# Altium footprint library PCB1.PcbLib: 14 footprints
Each footprint in its own frame and in the unit in brackets; x right, y up, seen from the top. Pads: shape width x height; smd on the part's side, far side on the other; paste and mask are expansions set on the pad; w line width, h text height; cw(c..) or ccw(c..) is an arc to the next point about the centre after c.
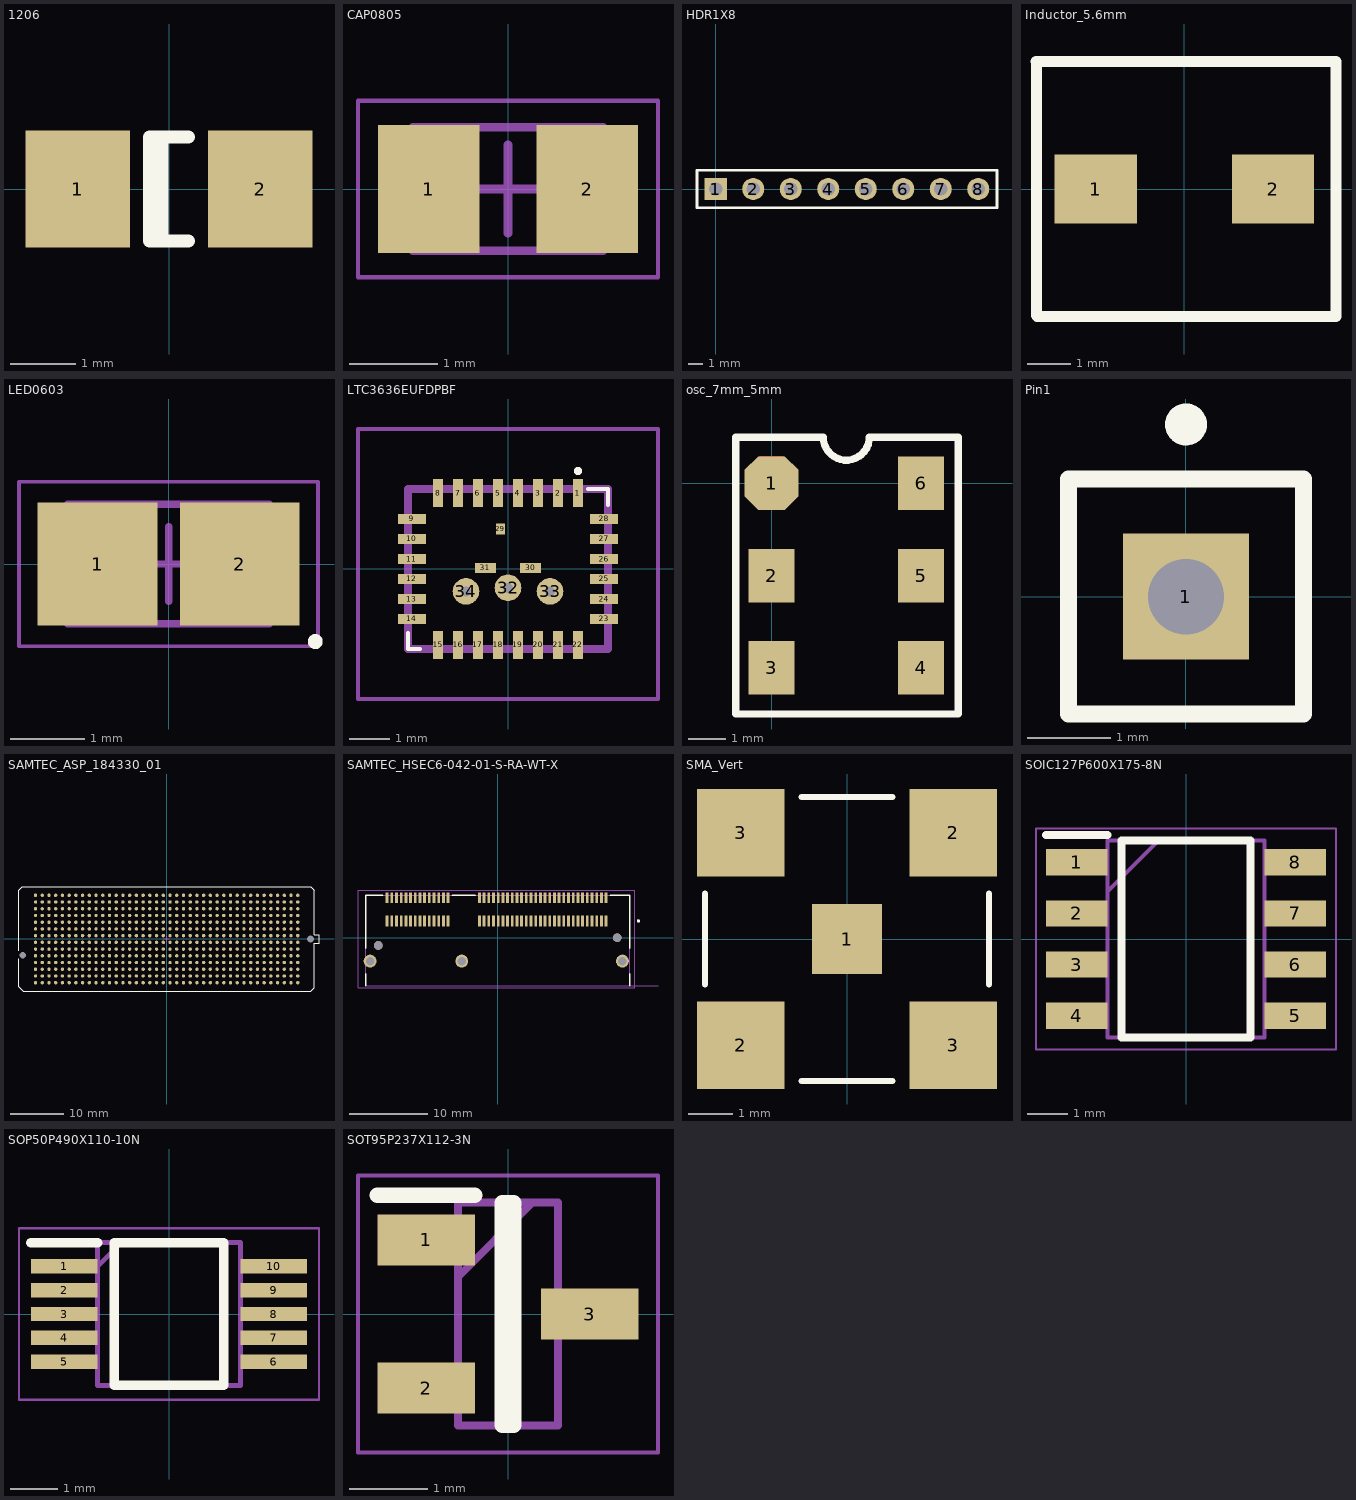
[diagram p0: the footprints below, top view; thin cyan lines are the x and y axes]

## 1206 [mm] "Chip Capacitor; Body 3.2 x 1.6 mm (LxW typ)"
height 1.5
pads (2):
  rect 1.6x1.8 smd: 1(-1.4,0) 2(1.4,0)
Top Overlay:
  lines w0.2: -0.11,-0.8 -0.11,0.8 ; 0.3,-0.8 -0.3,-0.8 -0.3,0.8 0.3,0.8

## CAP0805 [mm]
height 1
pads (2):
  rect 1.15x1.45 smd: 1(-0.9,0) 2(0.9,0)
Mechanical 13:
  lines w0.1: -1.075,-0.7 1.075,-0.7 1.075,0.7 -1.075,0.7 -1.075,-0.7
Mechanical 15:
  lines w0.05: -1.7,-1 1.7,-1 1.7,1 -1.7,1 -1.7,-1
  lines w0.1: -0.5,0 0.5,0 ; 0,-0.5 0,0.5
3D body: height 1, standoff 0, extent 0.675,-0.7 1.075,0.7
3D body: height 1, standoff 0, extent -1.075,-0.7 -0.675,0.7
3D body: height 1, standoff 0, extent -0.675,-0.7 0.675,0.7

## HDR1X8 [mm]
pads (8):
  rect 1.5x1.5 hole 0.9: 1(0,0)
  round 1.5 hole 0.9: 2(2.54,0) 3(5.08,0) 4(7.62,0) 5(10.16,0) 6(12.7,0) 7(15.24,0) 8(17.78,0)
Top Overlay:
  lines w0.2: -1.27,-1.27 -1.27,1.27 19.05,1.27 19.05,-1.27 -1.27,-1.27

## Inductor_5.6mm [mm]
pads (2):
  rect 1.9x1.6 smd: 1(-2.05,0) 2(2.05,0)
Top Overlay:
  lines w0.254: -3.429,2.95 3.505,2.95 3.505,-2.95 -3.4,-2.95 -3.423,-2.927 -3.423,-0.051 -3.423,2.899

## LED0603 [mm]
height 1
pads (2):
  rect 1.6x1.65 smd: 1(-0.95,0) 2(0.95,0)
Top Overlay:
  circle w0.1: c1.962,-1.037 r0.05
Mechanical 13:
  lines w0.1: -1.35,-0.8 1.35,-0.8 1.35,0.8 -1.35,0.8 -1.35,-0.8
Mechanical 15:
  lines w0.05: -2,-1.1 2,-1.1 2,1.1 -2,1.1 -2,-1.1
  lines w0.1: -0.5,0 0.5,0 ; 0,-0.5 0,0.5
3D body: height 1, standoff 0, extent 0.35,-0.8 1.35,0.8
3D body: height 1, standoff 0, extent -1.35,-0.8 -0.35,0.8
3D body: height 1, standoff 0, extent -0.35,-0.8 0.35,0.8

## LTC3636EUFDPBF [mm]
pads (34):
  rect 0.25x0.7 smd: 1(1.75,1.9) 2(1.25,1.9) 3(0.75,1.9) 4(0.25,1.9) 5(-0.25,1.9) 6(-0.75,1.9) 7(-1.25,1.9) 8(-1.75,1.9) 15(-1.75,-1.9) 16(-1.25,-1.9) 17(-0.75,-1.9) 18(-0.25,-1.9) 19(0.25,-1.9) 20(0.75,-1.9) 21(1.25,-1.9) 22(1.75,-1.9)
  rect 0.7x0.25 smd: 9(-2.4,1.25) 10(-2.4,0.75) 11(-2.4,0.25) 12(-2.4,-0.25) 13(-2.4,-0.75) 14(-2.4,-1.25) 23(2.4,-1.25) 24(2.4,-0.75) 25(2.4,-0.25) 26(2.4,0.25) 27(2.4,0.75) 28(2.4,1.25)
  rect 0.23x0.28 smd: 29(-0.19,1)
  rect 0.53x0.25 smd: 30(0.565,0.03) 31(-0.565,0.03)
  round 0.667 hole 0.25: 32(0,-0.47) 33(1.05,-0.56) 34(-1.05,-0.56)
Top Overlay:
  lines w0.1: -2.5,-1.6 -2.5,-2 -2.2,-2 ; 2,2 2.5,2 2.5,1.6 ; 1.75,2.4 ccw(c1.75,2.45) 1.75,2.5 ccw(c1.75,2.45) 1.75,2.4
Mechanical 13:
  lines w0.2: -2.5,-2 2.5,-2 2.5,2 -2.5,2 -2.5,-2
Mechanical 15:
  lines w0.1: -3.75,-3.25 3.75,-3.25 3.75,3.5 -3.75,3.5 -3.75,-3.25
3D body "LTC3636EUFD#PBF.stp": height 0.9, standoff -5, extent -2.5,-2 2.5,2

## osc_7mm_5mm [mm]
pads (6):
  oct 1.45x1.45 smd: 1(0,0)
  rect 1.25x1.45 smd: 2(0,-2.5) 3(0,-5) 4(4.05,-5) 5(4.05,-2.5) 6(4.05,0)
Top Layer:
  region: -0.625,-0.412 -0.312,-0.725 0.312,-0.725 0.625,-0.412 0.625,0.412 0.312,0.725 -0.312,0.725 -0.625,0.412
Top Overlay:
  lines w0.2: -0.965,-6.25 -0.965,1.25 1.4,1.25 ccw(c2.025,1.25) 2.65,1.25 5.055,1.25 5.055,-6.25 -0.965,-6.25

## Pin1 [mm]
pads (1):
  rect 1.5x1.5 hole 0.9: 1(0,0)
Top Overlay:
  circle w0.25: c0,2.05 r0.125
  lines w0.2: -1.4,-1.4 -1.4,1.4 1.4,1.4 1.4,-1.4 -1.4,-1.4

## SAMTEC_ASP_184330_01 [mm]
pads (562):
  round 0.64 smd: A1(24.765,5.715) A2(23.495,5.715) A3(22.225,5.715) A4(20.955,5.715) A5(19.685,5.715) A6(18.415,5.715) A7(17.145,5.715) A8(15.875,5.715) A9(14.605,5.715) A10(13.335,5.715) A11(12.065,5.715) A12(10.795,5.715) A13(9.525,5.715) A14(8.255,5.715) A15(6.985,5.715) A16(5.715,5.715) A17(4.445,5.715) A18(3.175,5.715) A19(1.905,5.715) A20(0.635,5.715) A21(-0.635,5.715) A22(-1.905,5.715) A23(-3.175,5.715) A24(-4.445,5.715) A25(-5.715,5.715) A26(-6.985,5.715) A27(-8.255,5.715) A28(-9.525,5.715) A29(-10.795,5.715) A30(-12.065,5.715) A31(-13.335,5.715) A32(-14.605,5.715) A33(-15.875,5.715) A34(-17.145,5.715) A35(-18.415,5.715) A36(-19.685,5.715) A37(-20.955,5.715) A38(-22.225,5.715) A39(-23.495,5.715) A40(-24.765,5.715) B1(24.765,4.445) B2(23.495,4.445) B3(22.225,4.445) B4(20.955,4.445) B5(19.685,4.445) B6(18.415,4.445) B7(17.145,4.445) B8(15.875,4.445) B9(14.605,4.445) B10(13.335,4.445) B11(12.065,4.445) B12(10.795,4.445) B13(9.525,4.445) B14(8.255,4.445) B15(6.985,4.445) B16(5.715,4.445) B17(4.445,4.445) B18(3.175,4.445) B19(1.905,4.445) B20(0.635,4.445) B21(-0.635,4.445) B22(-1.905,4.445) B23(-3.175,4.445) B24(-4.445,4.445) B25(-5.715,4.445) B26(-6.985,4.445) B27(-8.255,4.445) B28(-9.525,4.445) B29(-10.795,4.445) B30(-12.065,4.445) B31(-13.335,4.445) B32(-14.605,4.445) B33(-15.875,4.445) B34(-17.145,4.445) B35(-18.415,4.445) B36(-19.685,4.445) B37(-20.955,4.445) B38(-22.225,4.445) B39(-23.495,4.445) B40(-24.765,4.445) C1(24.765,3.175) C2(23.495,3.175) C3(22.225,3.175) C4(20.955,3.175) C5(19.685,3.175) C6(18.415,3.175) C7(17.145,3.175) C8(15.875,3.175) C9(14.605,3.175) C10(13.335,3.175) C11(12.065,3.175) C12(10.795,3.175) C13(9.525,3.175) C14(8.255,3.175) C15(6.985,3.175) C16(5.715,3.175) C17(4.445,3.175) C18(3.175,3.175) C19(1.905,3.175) C20(0.635,3.175) C21(-0.635,3.175) C22(-1.905,3.175) C23(-3.175,3.175) C24(-4.445,3.175) C25(-5.715,3.175) C26(-6.985,3.175) C27(-8.255,3.175) C28(-9.525,3.175) C29(-10.795,3.175) C30(-12.065,3.175) C31(-13.335,3.175) C32(-14.605,3.175) C33(-15.875,3.175) C34(-17.145,3.175) C35(-18.415,3.175) C36(-19.685,3.175) C37(-20.955,3.175) C38(-22.225,3.175) C39(-23.495,3.175) C40(-24.765,3.175) D1(24.765,1.905) D2(23.495,1.905) D3(22.225,1.905) D4(20.955,1.905) D5(19.685,1.905) D6(18.415,1.905) D7(17.145,1.905) D8(15.875,1.905) D9(14.605,1.905) D10(13.335,1.905) D11(12.065,1.905) D12(10.795,1.905) D13(9.525,1.905) D14(8.255,1.905) D15(6.985,1.905) D16(5.715,1.905) D17(4.445,1.905) D18(3.175,1.905) D19(1.905,1.905) D20(0.635,1.905) D21(-0.635,1.905) D22(-1.905,1.905) D23(-3.175,1.905) D24(-4.445,1.905) D25(-5.715,1.905) D26(-6.985,1.905) D27(-8.255,1.905) D28(-9.525,1.905) D29(-10.795,1.905) D30(-12.065,1.905) D31(-13.335,1.905) D32(-14.605,1.905) D33(-15.875,1.905) D34(-17.145,1.905) D35(-18.415,1.905) D36(-19.685,1.905) D37(-20.955,1.905) D38(-22.225,1.905) D39(-23.495,1.905) D40(-24.765,1.905) E1(24.765,0.635) E2(23.495,0.635) E3(22.225,0.635) E4(20.955,0.635) E5(19.685,0.635) E6(18.415,0.635) E7(17.145,0.635) E8(15.875,0.635) E9(14.605,0.635) E10(13.335,0.635) E11(12.065,0.635) E12(10.795,0.635) E13(9.525,0.635) E14(8.255,0.635) E15(6.985,0.635) E16(5.715,0.635) E17(4.445,0.635) E18(3.175,0.635) E19(1.905,0.635) E20(0.635,0.635) E21(-0.635,0.635) E22(-1.905,0.635) E23(-3.175,0.635) E24(-4.445,0.635) E25(-5.715,0.635) E26(-6.985,0.635) E27(-8.255,0.635) E28(-9.525,0.635) E29(-10.795,0.635) E30(-12.065,0.635) E31(-13.335,0.635) E32(-14.605,0.635) E33(-15.875,0.635) E34(-17.145,0.635) E35(-18.415,0.635) E36(-19.685,0.635) E37(-20.955,0.635) E38(-22.225,0.635) E39(-23.495,0.635) E40(-24.765,0.635) F1(24.765,-0.635) F2(23.495,-0.635) F3(22.225,-0.635) F4(20.955,-0.635) F5(19.685,-0.635) F6(18.415,-0.635) F7(17.145,-0.635) F8(15.875,-0.635) F9(14.605,-0.635) F10(13.335,-0.635) F11(12.065,-0.635) F12(10.795,-0.635) F13(9.525,-0.635) F14(8.255,-0.635) F15(6.985,-0.635) F16(5.715,-0.635) F17(4.445,-0.635) F18(3.175,-0.635) F19(1.905,-0.635) F20(0.635,-0.635) F21(-0.635,-0.635) F22(-1.905,-0.635) F23(-3.175,-0.635) F24(-4.445,-0.635) F25(-5.715,-0.635) F26(-6.985,-0.635) F27(-8.255,-0.635) F28(-9.525,-0.635) F29(-10.795,-0.635) F30(-12.065,-0.635) F31(-13.335,-0.635) F32(-14.605,-0.635) F33(-15.875,-0.635) F34(-17.145,-0.635) F35(-18.415,-0.635) F36(-19.685,-0.635) F37(-20.955,-0.635) F38(-22.225,-0.635) F39(-23.495,-0.635) F40(-24.765,-0.635) G1(24.765,-1.905) G2(23.495,-1.905) G3(22.225,-1.905) G4(20.955,-1.905) G5(19.685,-1.905) G6(18.415,-1.905) G7(17.145,-1.905) G8(15.875,-1.905) G9(14.605,-1.905) G10(13.335,-1.905) G11(12.065,-1.905) G12(10.795,-1.905) G13(9.525,-1.905) G14(8.255,-1.905) G15(6.985,-1.905) G16(5.715,-1.905) G17(4.445,-1.905) G18(3.175,-1.905) G19(1.905,-1.905) G20(0.635,-1.905) G21(-0.635,-1.905) G22(-1.905,-1.905) G23(-3.175,-1.905) G24(-4.445,-1.905) G25(-5.715,-1.905) G26(-6.985,-1.905) G27(-8.255,-1.905) G28(-9.525,-1.905) G29(-10.795,-1.905) G30(-12.065,-1.905) G31(-13.335,-1.905) G32(-14.605,-1.905) G33(-15.875,-1.905) G34(-17.145,-1.905) G35(-18.415,-1.905) G36(-19.685,-1.905) G37(-20.955,-1.905) G38(-22.225,-1.905) G39(-23.495,-1.905) G40(-24.765,-1.905) H1(24.765,-3.175) H2(23.495,-3.175) H3(22.225,-3.175) H4(20.955,-3.175) H5(19.685,-3.175) H6(18.415,-3.175) H7(17.145,-3.175) H8(15.875,-3.175) H9(14.605,-3.175) H10(13.335,-3.175) H11(12.065,-3.175) H12(10.795,-3.175) H13(9.525,-3.175) H14(8.255,-3.175) H15(6.985,-3.175) H16(5.715,-3.175) H17(4.445,-3.175) H18(3.175,-3.175) H19(1.905,-3.175) H20(0.635,-3.175) H21(-0.635,-3.175) H22(-1.905,-3.175) H23(-3.175,-3.175) H24(-4.445,-3.175) H25(-5.715,-3.175) H26(-6.985,-3.175) H27(-8.255,-3.175) H28(-9.525,-3.175) H29(-10.795,-3.175) H30(-12.065,-3.175) H31(-13.335,-3.175) H32(-14.605,-3.175) H33(-15.875,-3.175) H34(-17.145,-3.175) H35(-18.415,-3.175) H36(-19.685,-3.175) H37(-20.955,-3.175) H38(-22.225,-3.175) H39(-23.495,-3.175) H40(-24.765,-3.175) J1(24.765,-4.445) J2(23.495,-4.445) J3(22.225,-4.445) J4(20.955,-4.445) J5(19.685,-4.445) J6(18.415,-4.445) J7(17.145,-4.445) J8(15.875,-4.445) J9(14.605,-4.445) J10(13.335,-4.445) J11(12.065,-4.445) J12(10.795,-4.445) J13(9.525,-4.445) J14(8.255,-4.445) J15(6.985,-4.445) J16(5.715,-4.445) J17(4.445,-4.445) J18(3.175,-4.445) J19(1.905,-4.445) J20(0.635,-4.445) J21(-0.635,-4.445) J22(-1.905,-4.445) J23(-3.175,-4.445) J24(-4.445,-4.445) J25(-5.715,-4.445) J26(-6.985,-4.445) J27(-8.255,-4.445) J28(-9.525,-4.445) J29(-10.795,-4.445) J30(-12.065,-4.445) J31(-13.335,-4.445) J32(-14.605,-4.445) J33(-15.875,-4.445) J34(-17.145,-4.445) J35(-18.415,-4.445) J36(-19.685,-4.445) J37(-20.955,-4.445) J38(-22.225,-4.445) J39(-23.495,-4.445) J40(-24.765,-4.445) K1(24.765,-5.715) K2(23.495,-5.715) K3(22.225,-5.715) K4(20.955,-5.715) K5(19.685,-5.715) K6(18.415,-5.715) K7(17.145,-5.715) K8(15.875,-5.715) K9(14.605,-5.715) K10(13.335,-5.715) K11(12.065,-5.715) K12(10.795,-5.715) K13(9.525,-5.715) K14(8.255,-5.715) K15(6.985,-5.715) K16(5.715,-5.715) K17(4.445,-5.715) K18(3.175,-5.715) K19(1.905,-5.715) K20(0.635,-5.715) K21(-0.635,-5.715) K22(-1.905,-5.715) K23(-3.175,-5.715) K24(-4.445,-5.715) K25(-5.715,-5.715) K26(-6.985,-5.715) K27(-8.255,-5.715) K28(-9.525,-5.715) K29(-10.795,-5.715) K30(-12.065,-5.715) K31(-13.335,-5.715) K32(-14.605,-5.715) K33(-15.875,-5.715) K34(-17.145,-5.715) K35(-18.415,-5.715) K36(-19.685,-5.715) K37(-20.955,-5.715) K38(-22.225,-5.715) K39(-23.495,-5.715) K40(-24.765,-5.715) L1(24.765,-6.985) L2(23.495,-6.985) L3(22.225,-6.985) L4(20.955,-6.985) L5(19.685,-6.985) L6(18.415,-6.985) L7(17.145,-6.985) L8(15.875,-6.985) L9(14.605,-6.985) L10(13.335,-6.985) L11(12.065,-6.985) L12(10.795,-6.985) L13(9.525,-6.985) L14(8.255,-6.985) L15(6.985,-6.985) L16(5.715,-6.985) L17(4.445,-6.985) L18(3.175,-6.985) L19(1.905,-6.985) L20(0.635,-6.985) L21(-0.635,-6.985) L22(-1.905,-6.985) L23(-3.175,-6.985) L24(-4.445,-6.985) L25(-5.715,-6.985) L26(-6.985,-6.985) L27(-8.255,-6.985) L28(-9.525,-6.985) L29(-10.795,-6.985) L30(-12.065,-6.985) L31(-13.335,-6.985) L32(-14.605,-6.985) L33(-15.875,-6.985) L34(-17.145,-6.985) L35(-18.415,-6.985) L36(-19.685,-6.985) L37(-20.955,-6.985) L38(-22.225,-6.985) L39(-23.495,-6.985) l40(-24.765,-6.985) M1(24.765,-8.255) M2(23.495,-8.255) M3(22.225,-8.255) M4(20.955,-8.255) M5(19.685,-8.255) M6(18.415,-8.255) M7(17.145,-8.255) M8(15.875,-8.255) M9(14.605,-8.255) M10(13.335,-8.255) M11(12.065,-8.255) M12(10.795,-8.255) M13(9.525,-8.255) M14(8.255,-8.255) M15(6.985,-8.255) M16(5.715,-8.255) M17(4.445,-8.255) M18(3.175,-8.255) M19(1.905,-8.255) M20(0.635,-8.255) M21(-0.635,-8.255) M22(-1.905,-8.255) M23(-3.175,-8.255) M24(-4.445,-8.255) M25(-5.715,-8.255) M26(-6.985,-8.255) M27(-8.255,-8.255) M28(-9.525,-8.255) M29(-10.795,-8.255) M30(-12.065,-8.255) M31(-13.335,-8.255) M32(-14.605,-8.255) M33(-15.875,-8.255) M34(-17.145,-8.255) M35(-18.415,-8.255) M36(-19.685,-8.255) M37(-20.955,-8.255) M38(-22.225,-8.255) M39(-23.495,-8.255) M40(-24.765,-8.255) Y1(24.765,8.255) Y2(23.495,8.255) Y3(22.225,8.255) Y4(20.955,8.255) Y5(19.685,8.255) Y6(18.415,8.255) Y7(17.145,8.255) Y8(15.875,8.255) Y9(14.605,8.255) Y10(13.335,8.255) Y11(12.065,8.255) Y12(10.795,8.255) Y13(9.525,8.255) Y14(8.255,8.255) Y15(6.985,8.255) Y16(5.715,8.255) Y17(4.445,8.255) Y18(3.175,8.255) Y19(1.905,8.255) Y20(0.635,8.255) Y21(-0.635,8.255) Y22(-1.905,8.255) Y23(-3.175,8.255) Y24(-4.445,8.255) Y25(-5.715,8.255) Y26(-6.985,8.255) Y27(-8.255,8.255) Y28(-9.525,8.255) Y29(-10.795,8.255) Y30(-12.065,8.255) Y31(-13.335,8.255) Y32(-14.605,8.255) Y33(-15.875,8.255) Y34(-17.145,8.255) Y35(-18.415,8.255) Y36(-19.685,8.255) Y37(-20.955,8.255) Y38(-22.225,8.255) Y39(-23.495,8.255) Y40(-24.765,8.255) Z1(24.765,6.985) Z2(23.495,6.985) Z3(22.225,6.985) Z4(20.955,6.985) Z5(19.685,6.985) Z6(18.415,6.985) Z7(17.145,6.985) Z8(15.875,6.985) Z9(14.605,6.985) Z10(13.335,6.985) Z11(12.065,6.985) Z12(10.795,6.985) Z13(9.525,6.985) Z14(8.255,6.985) Z15(6.985,6.985) Z16(5.715,6.985) Z17(4.445,6.985) Z18(3.175,6.985) Z19(1.905,6.985) Z20(0.635,6.985) Z21(-0.635,6.985) Z22(-1.905,6.985) Z23(-3.175,6.985) Z24(-4.445,6.985) Z25(-5.715,6.985) Z26(-6.985,6.985) Z27(-8.255,6.985) Z28(-9.525,6.985) Z29(-10.795,6.985) Z30(-12.065,6.985) Z31(-13.335,6.985) Z32(-14.605,6.985) Z33(-15.875,6.985) Z34(-17.145,6.985) Z35(-18.415,6.985) Z36(-19.685,6.985) Z37(-20.955,6.985) Z38(-22.225,6.985) Z39(-23.495,6.985) Z40(-24.765,6.985)
  round 0.97 hole 1.27 unplated: MH1(-27.19,-3.05) MH2(27.19,0)
Top Overlay:
  lines w0.2: -27.888,-3.75 -27.888,-9.068 -27.074,-9.883 27.227,-9.883 27.89,-9.219 27.89,-0.764 28.779,-0.764 28.779,0.76 27.89,0.76 27.89,9.169 27.18,9.879 -27.231,9.879 -27.888,9.221 -27.888,-2.25
Mechanical 15:
  lines w0.1: -0.5,0 0.5,0 ; 0,-0.5 0,0.5
3D body: height 6.1, standoff 0, extent -27.94,-9.906 28.829,9.906

## SAMTEC_HSEC6-042-01-S-RA-WT-X [mm]
height 5.65
pads (89):
  rect 0.36x1.4 smd: A1(13.855,2.15) A2(13.254,2.15) A3(12.655,2.15) A4(12.054,2.15) A5(11.455,2.15) A6(10.854,2.15) A7(10.255,2.15) A8(9.654,2.15) A9(9.055,2.15) A10(8.454,2.15) A11(7.855,2.15) A12(7.254,2.15) A13(6.655,2.15) A14(6.054,2.15) A15(5.455,2.15) A16(4.854,2.15) A17(4.255,2.15) A18(3.655,2.15) A19(3.054,2.15) A20(2.455,2.15) A21(1.854,2.15) A22(1.255,2.15) A23(0.654,2.15) A24(0.055,2.15) A25(-0.546,2.15) A26(-1.145,2.15) A27(-1.746,2.15) A28(-2.345,2.15) A29(-6.355,2.15) A30(-6.956,2.15) A31(-7.555,2.15) A32(-8.156,2.15) A33(-8.755,2.15) A34(-9.356,2.15) A35(-9.955,2.15) A36(-10.556,2.15) A37(-11.155,2.15) A38(-11.756,2.15) A39(-12.355,2.15) A40(-12.956,2.15) A41(-13.555,2.15) A42(-14.155,2.15) B1(13.855,5.11) B2(13.254,5.11) B3(12.655,5.11) B4(12.054,5.11) B5(11.455,5.11) B6(10.854,5.11) B7(10.255,5.11) B8(9.654,5.11) B9(9.055,5.11) B10(8.454,5.11) B11(7.855,5.11) B12(7.254,5.11) B13(6.655,5.11) B14(6.054,5.11) B15(5.455,5.11) B16(4.854,5.11) B17(4.255,5.11) B18(3.655,5.11) B19(3.054,5.11) B20(2.455,5.11) B21(1.854,5.11) B22(1.255,5.11) B23(0.654,5.11) B24(0.055,5.11) B25(-0.546,5.11) B26(-1.145,5.11) B27(-1.746,5.11) B28(-2.345,5.11) B29(-6.355,5.11) B30(-6.956,5.11) B31(-7.555,5.11) B32(-8.156,5.11) B33(-8.755,5.11) B34(-9.356,5.11) B35(-9.955,5.11) B36(-10.556,5.11) B37(-11.155,5.11) B38(-11.756,5.11) B39(-12.355,5.11) B40(-12.956,5.11) B41(-13.555,5.11) B42(-14.155,5.11)
  round 1.65 hole 1.1: SH1(-16.328,-3) SH2(-4.607,-3) SH3(15.947,-3)
  round 1.1 hole 1.1 unplated: ""(-15.272,-1) ""(15.272,0)
Top Overlay:
  circle w0.2: c18,2.15 r0.1
  lines w0.2: -16.893,-6.15 -16.893,-4.65 ; -16.893,-1.35 -16.893,5.4 -14.686,5.4 ; -5.826,5.4 -2.876,5.4 ; 14.385,5.4 16.893,5.4 16.893,-1.35 ; 16.893,-6.15 16.893,-4.65
Top Paste:
  circle w1.3: c-4.607,-3 r0.65
  circle w1.3: c-16.328,-3 r0.65
  circle w1.3: c15.947,-3 r0.65
Mechanical 13:
  circle w0.2: c18,2.15 r0.1
  lines w0.1: 20.5,-6.15 16.893,-6.15 ; 16.893,-6.15 16.893,5.4 -16.893,5.4 -16.893,-6.15 16.893,-6.15
  text "PCB EDGE" at 17.75,-6 h0.81
Mechanical 15:
  lines w0.05: -17.878,-6.4 -17.878,6.06 17.498,6.06 17.498,-6.4 -17.878,-6.4

## SMA_Vert [mil] "SMA, Jack, SMT, Vertical"
height 375
pads (5):
  rect 62x62 smd: 1(0,0)
  rect 77x77 smd: 2(-93.5,-93.5) 2(93.5,93.5) 3(-93.5,93.5) 3(93.5,-93.5)
Top Overlay:
  lines w5: -125,-40 -125,40 ; -40,-125 40,-125 ; -40,125 40,125 ; 125,-40 125,40
3D body: height 375, standoff 0, extent -99.99,-99.87 100.01,99.88
3D body: height 100, standoff 0, extent -125,-125 125,125

## SOIC127P600X175-8N [mm]
pads (8):
  rect 1.525x0.65 smd: 1(-2.712,1.905) 2(-2.712,0.635) 3(-2.712,-0.635) 4(-2.712,-1.905) 5(2.712,-1.905) 6(2.712,-0.635) 7(2.712,0.635) 8(2.712,1.905)
Top Overlay:
  lines w0.2: -3.475,2.58 -1.95,2.58 ; -1.6,-2.45 -1.6,2.45 1.6,2.45 1.6,-2.45 -1.6,-2.45
Mechanical 13:
  lines w0.1: -1.95,1.18 -0.68,2.45 ; -1.95,-2.45 -1.95,2.45 1.95,2.45 1.95,-2.45 -1.95,-2.45
Mechanical 15:
  lines w0.05: -3.725,-2.75 -3.725,2.75 3.725,2.75 3.725,-2.75 -3.725,-2.75
3D body "NE555DR.stp": height 1.75, standoff 0, extent -3,-2.45 3,2.45

## SOP50P490X110-10N [mm]
pads (10):
  rect 1.4x0.3 smd: 1(-2.2,1) 2(-2.2,0.5) 3(-2.2,0) 4(-2.2,-0.5) 5(-2.2,-1) 6(2.2,-1) 7(2.2,-0.5) 8(2.2,0) 9(2.2,0.5) 10(2.2,1)
Top Overlay:
  lines w0.2: -2.9,1.5 -1.5,1.5 ; -1.15,-1.5 1.15,-1.5 1.15,1.5 -1.15,1.5 -1.15,-1.5
Mechanical 13:
  lines w0.1: -1.5,1 -1,1.5 ; -1.5,-1.5 1.5,-1.5 1.5,1.5 -1.5,1.5 -1.5,-1.5
Mechanical 15:
  lines w0.05: -3.15,-1.8 3.15,-1.8 3.15,1.8 -3.15,1.8 -3.15,-1.8
3D body "ADS1015LIDGSR.stp": height 1.1, standoff 0, extent -2.463,-1.5 2.463,1.5

## SOT95P237X112-3N [mm]
pads (3):
  rect 1.25x0.65 smd: 1(-1.05,0.95) 2(-1.05,-0.95) 3(1.05,0)
Top Overlay:
  lines w0.2: -1.675,1.525 -0.425,1.525 ; -0.075,-1.43 0.075,-1.43 0.075,1.43 -0.075,1.43 -0.075,-1.43
Mechanical 13:
  lines w0.1: -0.64,0.48 0.31,1.43 ; -0.64,-1.43 0.64,-1.43 0.64,1.43 -0.64,1.43 -0.64,-1.43
Mechanical 15:
  lines w0.05: -1.925,-1.775 1.925,-1.775 1.925,1.775 -1.925,1.775 -1.925,-1.775
3D body "MCP1700T-2502E_TT.stp": height 1.12, standoff 0, extent -1.185,-1.43 1.185,1.43